# Altium footprint library Propia.PcbLib: 378 footprints (part 18 of 24)
Each footprint in its own frame and in the unit in brackets; x right, y up, seen from the top. Pads: shape width x height; smd on the part's side, far side on the other; paste and mask are expansions set on the pad; w line width, h text height; cw(c..) or ccw(c..) is an arc to the next point about the centre after c.
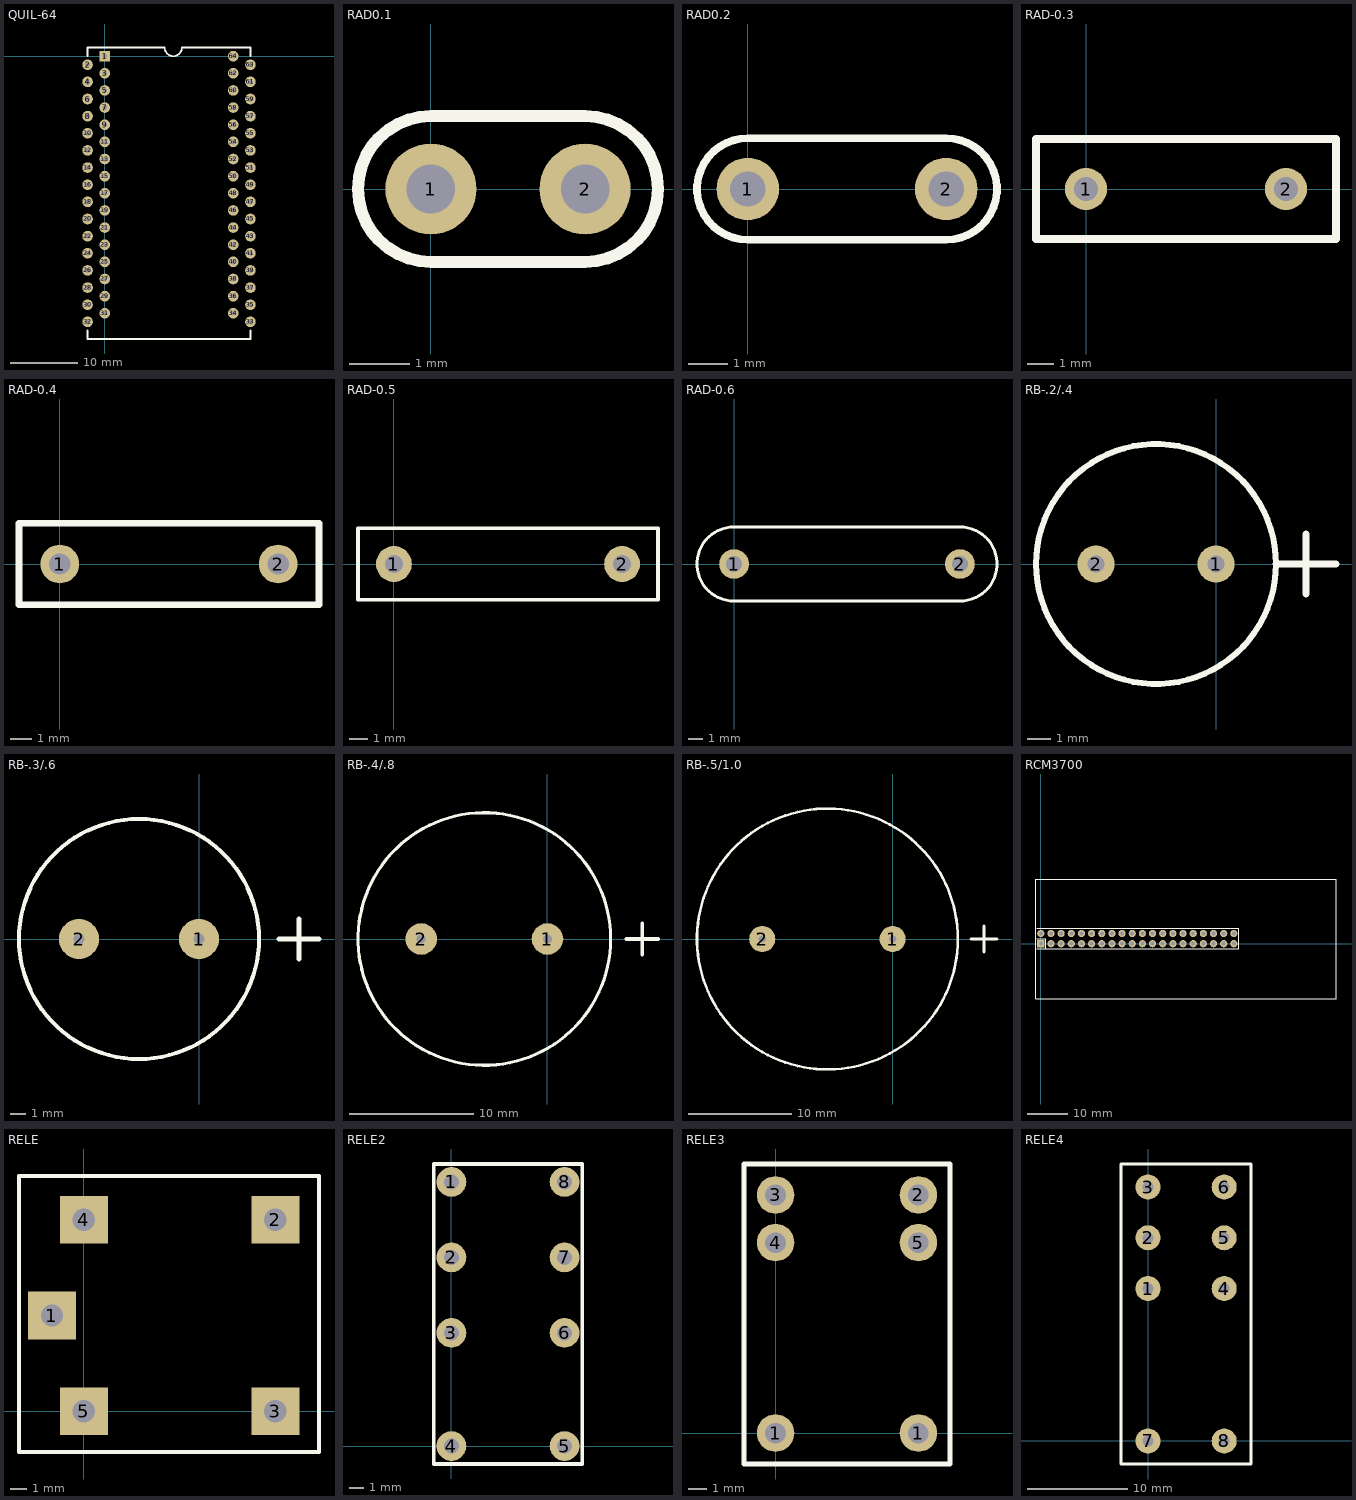
[diagram p17: the footprints below, top view; thin cyan lines are the x and y axes]

## QUIL-64 [mil]
pads (64):
  rect 62x62 hole 28: 1(0,0)
  round 62 hole 28: 2(-100,-50) 3(0,-100) 4(-100,-150) 5(0,-200) 6(-100,-250) 7(0,-300) 8(-100,-350) 9(0,-400) 10(-100,-450) 11(0,-500) 12(-100,-550) 13(0,-600) 14(-100,-650) 15(0,-700) 16(-100,-750) 17(0,-800) 18(-100,-850) 19(0,-900) 20(-100,-950) 21(0,-1000) 22(-100,-1050) 23(0,-1100) 24(-100,-1150) 25(0,-1200) 26(-100,-1250) 27(0,-1300) 28(-100,-1350) 29(0,-1400) 30(-100,-1450) 31(0,-1500) 32(-100,-1550) 33(850,-1550) 34(750,-1500) 35(850,-1450) 36(750,-1400) 37(850,-1350) 38(750,-1300) 39(850,-1250) 40(750,-1200) 41(850,-1150) 42(750,-1100) 43(850,-1050) 44(750,-1000) 45(850,-950) 46(750,-900) 47(850,-850) 48(750,-800) 49(850,-750) 50(750,-700) 51(850,-650) 52(750,-600) 53(850,-550) 54(750,-500) 55(850,-450) 56(750,-400) 57(850,-350) 58(750,-300) 59(850,-250) 60(750,-200) 61(850,-150) 62(750,-100) 63(850,-50) 64(750,0)
TopOverlay:
  lines w10: 350,50 ccw(c400,50) 450,50
  lines w12: -100,-1600 -100,-1650 850,-1650 850,-1600 ; -100,0 -100,50 350,50 ; 450,50 850,50 850,0

## RAD0.1 [mm]
pads (2):
  round 1.5 hole 0.8: 1(0,0) 2(2.54,0)
TopOverlay:
  lines w0.2: 0,-1.2 cw(c0,0) 0,1.2 2.54,1.2 cw(c2.54,0) 2.54,-1.2 0,-1.2

## RAD0.2 [mm]
pads (2):
  round 1.6 hole 0.9: 1(0,0) 2(5.08,0)
TopOverlay:
  lines w0.2: 0,-1.3 cw(c0,0) 0,1.3 5.08,1.3 cw(c5.08,0) 5.08,-1.3 0,-1.3

## RAD-0.3 [mm]
pads (2):
  round 1.6 hole 0.9: 1(0,0) 2(7.62,0)
TopOverlay:
  lines w0.305: -1.905,-1.905 -1.905,1.905 9.525,1.905 9.525,-1.905 -1.905,-1.905

## RAD-0.4 [mm]
pads (2):
  round 1.8 hole 1: 1(0,0) 2(10.16,0)
TopOverlay:
  lines w0.305: -1.905,-1.905 -1.905,1.905 12.065,1.905 12.065,-1.905 -1.905,-1.905

## RAD-0.5 [mm]
pads (2):
  round 2 hole 1: 1(0,0) 2(12.7,0)
TopOverlay:
  lines w0.2: -2,-2 0,-2 12.7,-2 14.7,-2 14.7,2 12.7,2 0,2 -2,2 -2,-2

## RAD-0.6 [mm]
pads (2):
  round 2 hole 1.1: 1(0,0) 2(15.24,0)
TopOverlay:
  lines w0.2: 0,-2.5 cw(c0,0) 0,2.5 15.24,2.5 cw(c15.24,0) 15.24,-2.5 0,-2.5

## RB-.2/.4 [mil]
pads (2):
  round 62 hole 28: 1(0,0) 2(-200,0)
TopOverlay:
  circle w10: c-100,0 r200
  lines w12: 100,0 200,0 ; 150,-50 150,50

## RB-.3/.6 [mil]
pads (2):
  round 100 hole 28: 1(0,0) 2(-300,0)
TopOverlay:
  circle w10: c-150,0 r300
  lines w12: 200,0 300,0 ; 250,-50 250,50

## RB-.4/.8 [mil]
pads (2):
  round 100 hole 28: 1(0,0) 2(-400,0)
TopOverlay:
  circle w10: c-200,0 r400
  lines w12: 250,0 350,0 ; 300,-50 300,50

## RB-.5/1.0 [mil]
pads (2):
  round 100 hole 28: 1(0,0) 2(-500,0)
TopOverlay:
  circle w10: c-250,0 r500
  lines w12: 300,0 400,0 ; 350,-50 350,50

## RCM3700 [mm]
pads (40):
  rect 1.8x1.8 hole 1: 1(0,0)
  round 1.8 hole 1: 2(0,2.54) 3(2.54,0) 4(2.54,2.54) 5(5.08,0) 6(5.08,2.54) 7(7.62,0) 8(7.62,2.54) 9(10.16,0) 10(10.16,2.54) 11(12.7,0) 12(12.7,2.54) 13(15.24,0) 14(15.24,2.54) 15(17.78,0) 16(17.78,2.54) 17(20.32,0) 18(20.32,2.54) 19(22.86,0) 20(22.86,2.54) 21(25.4,0) 22(25.4,2.54) 23(27.94,0) 24(27.94,2.54) 25(30.48,0) 26(30.48,2.54) 27(33.02,0) 28(33.02,2.54) 29(35.56,0) 30(35.56,2.54) 31(38.1,0) 32(38.1,2.54) 33(40.64,0) 34(40.64,2.54) 35(43.18,0) 36(43.18,2.54) 37(45.72,0) 38(45.72,2.54) 39(48.26,0) 40(48.26,2.54)
TopOverlay:
  lines w0.3: -1,-1.3 49.53,-1.27 49.53,3.81 -1,3.8 ; -1,1.2 1.2,1.2 1.2,-1.27 ; -1.2,-13.83 -1.2,16.17 73.8,16.17 73.8,-13.83 -1.2,-13.83

## RELE [mm]
pads (5):
  rect 3x3 hole 1.4: 1(-2,6) 2(12,12) 3(12,0) 4(0,12) 5(0,0)
TopOverlay:
  lines w0.254: -4.064,-2.54 14.732,-2.54 14.732,14.732 -4.064,14.732 -4.064,-2.032 -4.064,-2.54

## RELE2 [mm]
pads (8):
  round 2 hole 1: 1(0,17.78) 2(0,12.7) 3(0,7.62) 4(0,0) 5(7.62,0) 6(7.62,7.62) 7(7.62,12.7) 8(7.62,17.78)
TopOverlay:
  lines w0.254: -1.19,-1.21 -1.19,18.99 8.81,18.99 8.81,-1.21 -1.19,-1.21

## RELE3 [mm]
pads (6):
  round 2 hole 1.1: 1(0,0) 1(7.62,0) 2(7.62,12.7) 3(0,12.7) 4(0,10.16) 5(7.62,10.16)
TopOverlay:
  lines w0.254: -1.69,-1.65 -1.69,14.35 9.31,14.35 9.31,-1.65 -1.69,-1.65

## RELE4 [mm]
pads (8):
  round 2.5 hole 1.1: 1(0,15.24) 2(0,20.32) 3(0,25.4) 4(7.62,15.24) 5(7.62,20.32) 6(7.62,25.4) 7(0,0) 8(7.62,0)
TopOverlay:
  lines w0.254: -2.7,-2.3 10.3,-2.3 10.3,27.7 -2.7,27.7 -2.7,-2.3